# Altium schematic symbol library MG82F6D32AD32.SchLib: 1 symbol
Pins are listed as number, name and electrical type; pins without a type are passive.

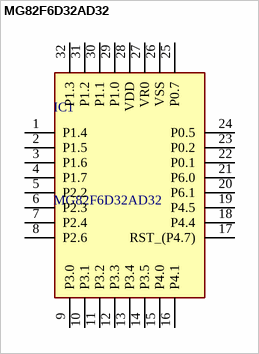
[diagram p0: symbol MG82F6D32AD32]

## MG82F6D32AD32
designator IC1
Single-chip 8-bits microcontroller; Manufacturer_Name: Megawin; Geometry.Height: 1.6mm; Manufacturer_Part_Number: MG82F6D32AD32; Mouser Part Number: *; Mouser Price/Stock: *; Arrow Part Number: *; Arrow Price/Stock: *; Datasheet Link: https://www.sunrom.com/p/mg82f6d32-megawin-mg82f6d32ad32-lqfp32-ic
footprint QFP80P900X900X160-32N
pins: 1 P1.4, 2 P1.5, 3 P1.6, 4 P1.7, 5 P2.2, 6 P2.3, 7 P2.4, 8 P2.6, 9 P3.0, 10 P3.1, 11 P3.2, 12 P3.3, 13 P3.4, 14 P3.5, 15 P4.0, 16 P4.1, 17 RST_(P4.7), 18 P4.4, 19 P4.5, 20 P6.1, 21 P6.0, 22 P0.1, 23 P0.2, 24 P0.5, 25 P0.7, 26 VSS, 27 VR0, 28 VDD, 29 P1.0, 30 P1.1, 31 P1.2, 32 P1.3